# Altium footprint library sEMG.PcbLib: 71 footprints (part 3 of 5)
Each footprint in its own frame and in the unit in brackets; x right, y up, seen from the top. Pads: shape width x height; smd on the part's side, far side on the other; paste and mask are expansions set on the pad; w line width, h text height; cw(c..) or ccw(c..) is an arc to the next point about the centre after c.
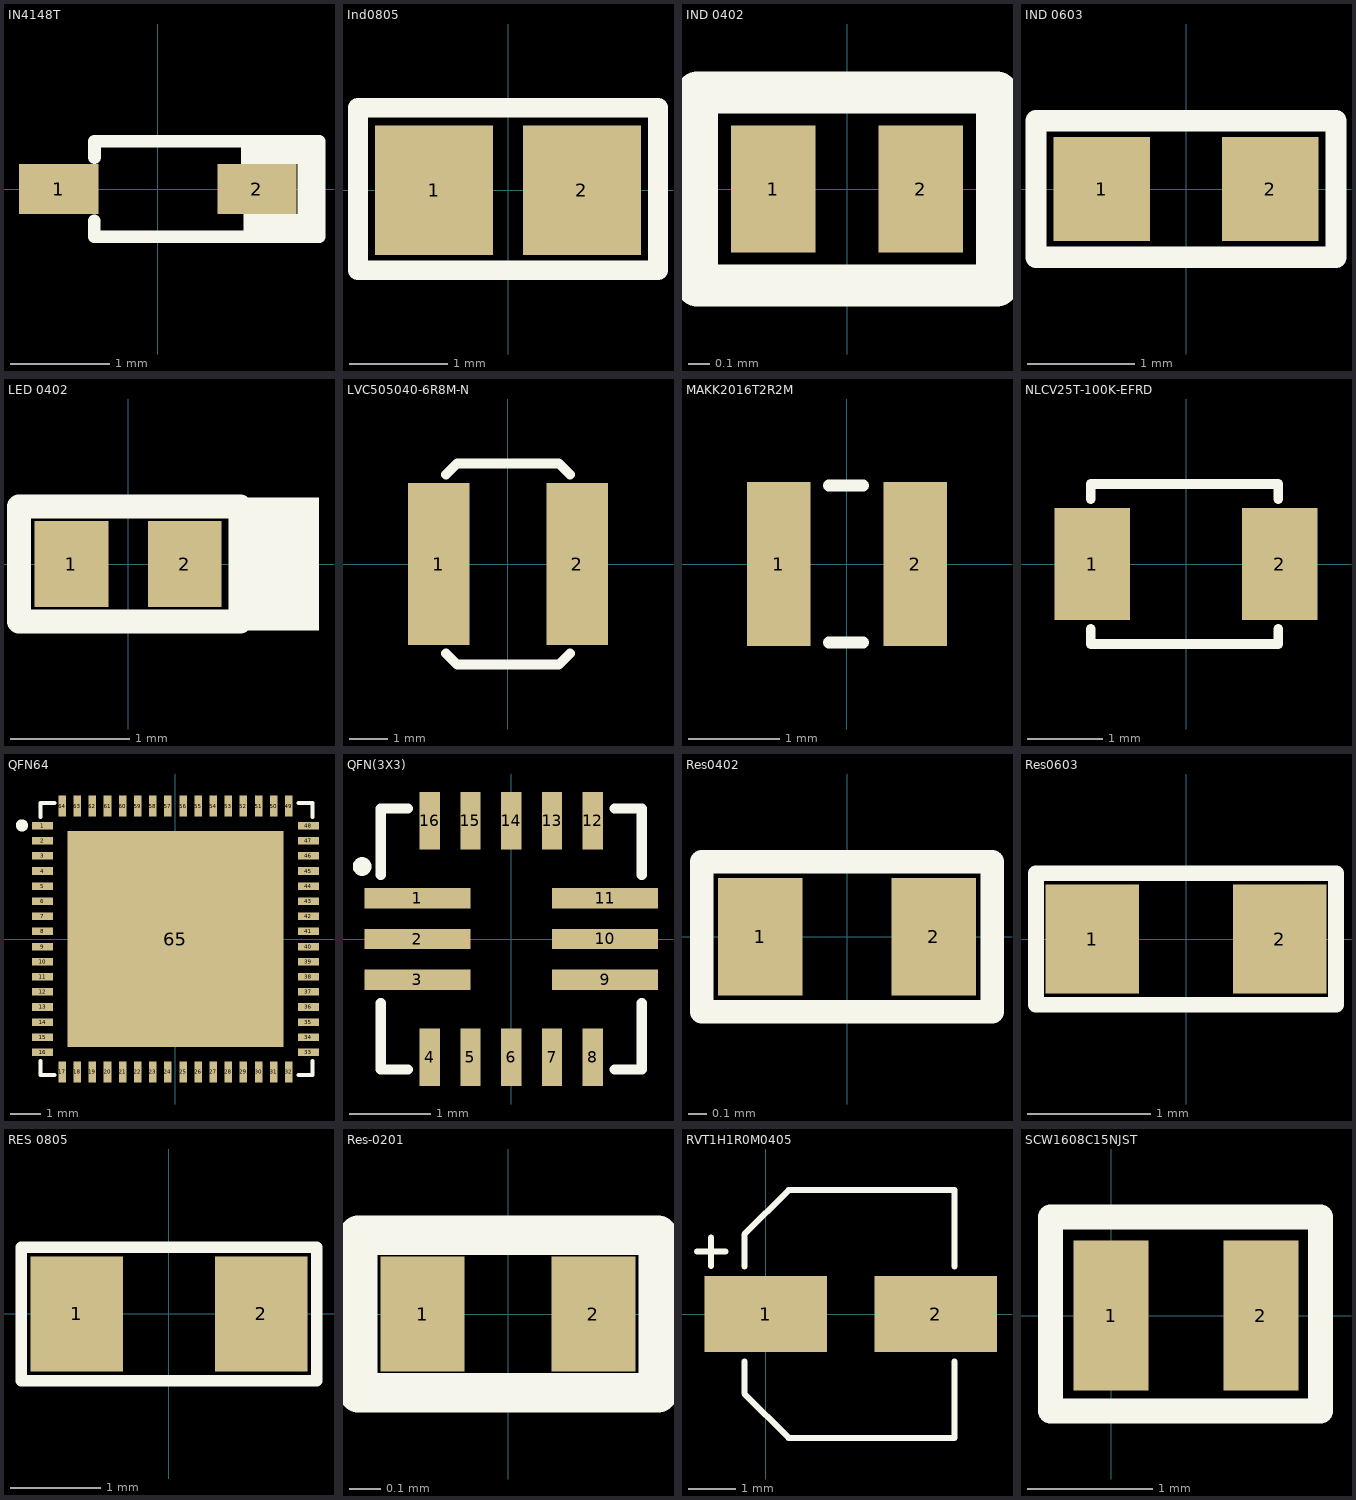
[diagram p2: the footprints below, top view; thin cyan lines are the x and y axes]

## IN4148T [mm] "DIODE SOD-523F"
pads (2):
  rect 0.8x0.5 smd: 1(-1,0) 2(1,0)
Top Overlay:
  rectangle: 0.838,0.254 1.575,0.483
  rectangle: 0.864,-0.483 1.626,-0.254
  rectangle: 1.409,-0.321 1.575,0.347
  lines w0.127: -0.641,-0.319 -0.641,-0.483 1.626,-0.483 1.626,0.483 -0.639,0.483 -0.639,0.318
3D body "User Library-SOD523F.STEP": height 0.7, standoff 0, extent -0.85,-0.45 0.85,0.45

## Ind0805 [mm] "Inductor 0805"
pads (2):
  rect 1.2x1.32 smd: 1(-0.75,0) 2(0.75,0)
Top Overlay:
  lines w0.2: -1.524,-0.813 -1.524,0.838 1.524,0.838 1.524,-0.813 -1.524,-0.813
3D body "45637.stp": height 0.47, standoff -0.03, extent -1,-0.625 1,0.625

## IND 0402 [mm]
pads (2):
  rect 0.4x0.6 smd: 1(-0.35,0) 2(0.35,0)
Top Overlay:
  lines w0.2: -0.711,-0.457 -0.305,-0.457 0.711,-0.457 0.711,0.457 -0.305,0.457 -0.711,0.457 -0.711,-0.457
3D body "User Library-d0402h025.step": height 0.25, standoff 0, extent -0.5,-0.25 0.5,0.25

## IND 0603 [mm]
pads (2):
  rect 0.9x0.97 smd: 1(-0.785,0) 2(0.785,0)
Top Overlay:
  lines w0.2: -1.397,-0.635 -1.397,0.635 1.397,0.635 1.397,-0.635 -1.397,-0.635
3D body "45630.stp": height 0.78, standoff -0.02, extent -0.8,-0.4 0.8,0.4

## LED 0402 [mm]
pads (2):
  rect 0.62x0.72 smd: 1(-0.475,0) 2(0.475,0)
Top Overlay:
  rectangle: 0.94,-0.559 1.6,0.559
  lines w0.2: -0.914,-0.483 0.94,-0.483 0.94,0.483 -0.914,0.483 -0.914,-0.483
3D body "User Library-LED-0402.step": height 0.45, standoff 0, extent -0.505,-0.25 0.505,0.25

## LVC505040-6R8M-N [mm]
pads (2):
  rect 1.6x4.2 smd: 1(-1.8,0) 2(1.8,0)
Top Overlay:
  lines w0.254: -1.613,-2.324 -1.321,-2.616 1.295,-2.616 ; -1.613,2.324 -1.321,2.616 1.295,2.616 ; 1.321,-2.616 1.613,-2.324 ; 1.321,2.616 1.613,2.324
3D body "srn5020-100m.stp": height 2, standoff 0, extent -2.5,-2.5 2.5,2.5

## MAKK2016T2R2M [mm]
pads (2):
  rect 0.7x1.8 smd: 1(-0.75,0) 2(0.75,0)
Top Overlay:
  lines w0.127: -0.203,-0.864 0.178,-0.864 ; -0.203,0.864 0.178,0.864
3D body "MAKK2016T2R2M.STEP": height 1, standoff 0, extent -1,-0.8 1,0.8

## NLCV25T-100K-EFRD [mm]
pads (2):
  rect 1x1.5 smd: 1(-1.25,0) 2(1.25,0)
Top Overlay:
  lines w0.127: -1.27,-0.864 -1.27,-1.067 1.219,-1.067 ; -1.27,0.864 -1.27,1.067 1.219,1.067 ; 1.23,-1.067 1.23,-0.864 ; 1.23,0.864 1.23,1.067
3D body "NLCV25T-100K-EFRD.STEP": height 1.9, standoff 0, extent -1.25,-1 1.25,1

## QFN64 [mm]
pads (65):
  rect 0.7x0.25 smd: 1(-4.4,3.75) 2(-4.4,3.25) 3(-4.4,2.75) 4(-4.4,2.25) 5(-4.4,1.75) 6(-4.4,1.25) 7(-4.4,0.75) 8(-4.4,0.25) 9(-4.4,-0.25) 10(-4.4,-0.75) 11(-4.4,-1.25) 12(-4.4,-1.75) 13(-4.4,-2.25) 14(-4.4,-2.75) 15(-4.4,-3.25) 16(-4.4,-3.75) 33(4.4,-3.75) 34(4.4,-3.25) 35(4.4,-2.75) 36(4.4,-2.25) 37(4.4,-1.75) 38(4.4,-1.25) 39(4.4,-0.75) 40(4.4,-0.25) 41(4.4,0.25) 42(4.4,0.75) 43(4.4,1.25) 44(4.4,1.75) 45(4.4,2.25) 46(4.4,2.75) 47(4.4,3.25) 48(4.4,3.75)
  rect 0.25x0.7 smd: 17(-3.75,-4.4) 18(-3.25,-4.4) 19(-2.75,-4.4) 20(-2.25,-4.4) 21(-1.75,-4.4) 22(-1.25,-4.4) 23(-0.75,-4.4) 24(-0.25,-4.4) 25(0.25,-4.4) 26(0.75,-4.4) 27(1.25,-4.4) 28(1.75,-4.4) 29(2.25,-4.4) 30(2.75,-4.4) 31(3.25,-4.4) 32(3.75,-4.4) 49(3.75,4.4) 50(3.25,4.4) 51(2.75,4.4) 52(2.25,4.4) 53(1.75,4.4) 54(1.25,4.4) 55(0.75,4.4) 56(0.25,4.4) 57(-0.25,4.4) 58(-0.75,4.4) 59(-1.25,4.4) 60(-1.75,4.4) 61(-2.25,4.4) 62(-2.75,4.4) 63(-3.25,4.4) 64(-3.75,4.4)
  rect 7.15x7.15 smd: 65(0,0)
Top Overlay:
  circle w0.2: c-5.08,3.759 r0.1
  lines w0.127: -4.465,-4.039 -4.465,-4.5 -4.004,-4.5 ; -4.465,4.039 -4.465,4.5 -4.004,4.5 ; 4.074,-4.5 4.535,-4.5 4.535,-4.039 ; 4.074,4.5 4.535,4.5 4.535,4.039
3D body "User Library-QFN64-2.step": height 0.9, standoff 0, extent -4.52,-4.52 4.52,4.52

## QFN(3X3) [mm]
pads (16):
  rect 1.3x0.25 smd: 1(-1.15,0.5) 2(-1.15,0) 3(-1.15,-0.5) 9(1.15,-0.5) 10(1.15,0) 11(1.15,0.5)
  rect 0.25x0.7 smd: 4(-1,-1.45) 5(-0.5,-1.45) 6(0,-1.45) 7(0.5,-1.45) 8(1,-1.45) 12(1,1.45) 13(0.5,1.45) 14(0,1.45) 15(-0.5,1.45) 16(-1,1.45)
Top Overlay:
  circle w0.127: c-1.829,0.889 r0.051
  lines w0.127: -1.6,-0.787 -1.6,-1.6 -1.27,-1.6 ; -1.6,0.787 -1.6,1.6 -1.27,1.6 ; 1.27,-1.6 1.6,-1.6 1.6,-0.787 ; 1.27,1.6 1.6,1.6 1.6,0.787
3D body "QFN-16_3MM×3MM_MNP_MPS.step": height 0.94, standoff 0, extent -1.549,-1.549 1.549,1.549

## Res0402 [mil]
pads (2):
  rect 18x25 smd mask+4: 1(-18.5,0) 2(18.5,0)
Top Overlay:
  lines w0.13: -32,-17 32,-17
  lines w5: -31,-16 31,-16 31,16 -31,16 -31,-16
3D body "User Library-RES_1005-0402.step": height 16.14, standoff 0, extent -22.63,-10.82 22.64,10.83

## Res0603 [mil]
pads (2):
  rect 30x35 smd: 1(-30,0) 2(30,0)
Top Overlay:
  lines w5: -48,-21 -48,21 48,21 48,-21 -48,-21
3D body "User Library-RESC1608X05N.step": height 17.76, standoff 0, extent -30.52,-16.74 30.51,16.73

## RES 0805 [mil] "SMD 0805"
pads (2):
  rect 40x50 smd: 1(-40,0) 2(40,0)
Top Overlay:
  lines w5: -64,-29 -64,29 64,29 64,-29 -64,-29
3D body "User Library-CR2012-0805.STEP": height 23.62, standoff 0, extent -39.34,-24.75 39.4,24.46

## Res-0201 [mm]
pads (2):
  rect 0.27x0.37 smd: 1(-0.275,0) 2(0.275,0)
Top Overlay:
  lines w0.127: -0.483,-0.254 -0.483,0.254 0.483,0.254 0.483,-0.254 -0.483,-0.254
3D body "User Library-0201(0603M) Res.step": height 0.29, standoff -0.02, extent -0.305,-0.152 0.305,0.153

## RVT1H1R0M0405 [mm]
pads (2):
  rect 2.6x1.6 smd: 1(0,0) 2(3.6,0)
Top Overlay:
  lines w0.127: -1.456,1.319 -0.856,1.319 ; -1.156,1.019 -1.156,1.619 -1.156,1.319 ; -0.452,-1.005 -0.452,-1.687 0.485,-2.624 4.001,-2.624 4.001,-1.005 ; -0.452,1.005 -0.452,1.687 0.485,2.624 4.001,2.624 4.001,1.005

## SCW1608C15NJST [mm]
pads (2):
  rect 0.6x1.2 smd: 1(0,0) 2(1.2,0)
Top Overlay:
  lines w0.2: -0.483,-0.762 1.676,-0.762 1.676,0.787 -0.483,0.787 -0.483,-0.762